# Altium schematic symbol library RN1103TE85L,F.SchLib: 1 symbol
Pins are listed as number, name and electrical type; pins without a type are passive.

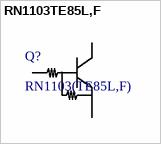
[diagram p0: symbol RN1103TE85L,F]

## RN1103TE85L,F
designator Q?, comment RN1103(TE85L,F)
No Description Available; Manufacturer_Name: Toshiba Electronic Devices & Storage Corp.; Copyright: Copyright (C) 2026 Ultra Librarian. All rights reserved.; Manufacturer_Part_Number: RN1103(TE85L,F); RefDes: Refdes; Type: Type
footprint SSM_TOS
pins: 1 B, 2 E, 3 C